# Altium footprint library Resistor$.PcbLib: 99 footprints (part 7 of 7)
Each footprint in its own frame and in the unit in brackets; x right, y up, seen from the top. Pads: shape width x height; smd on the part's side, far side on the other; paste and mask are expansions set on the pad; w line width, h text height; cw(c..) or ccw(c..) is an arc to the next point about the centre after c.
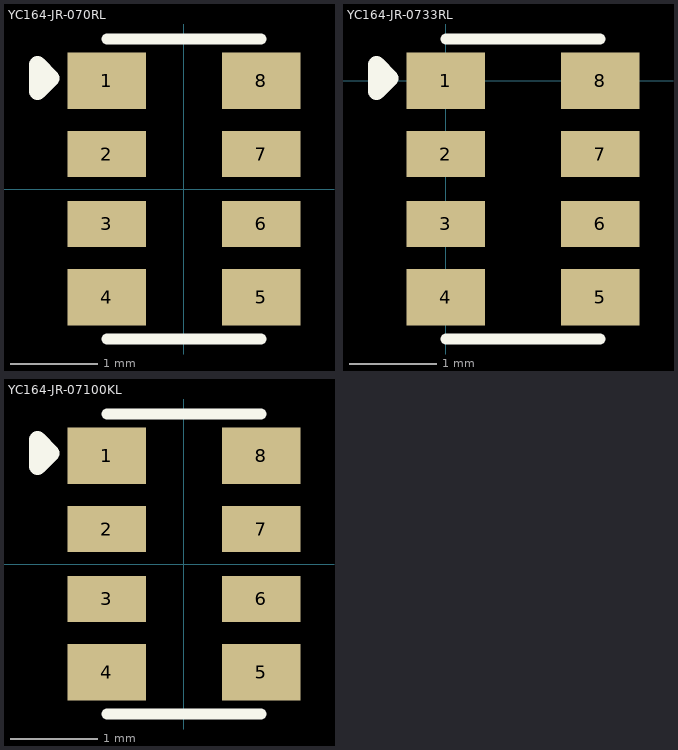
[diagram p6: the footprints below, top view; thin cyan lines are the x and y axes]

## YC164-JR-070RL [mm]
pads (8):
  rect 0.9x0.65 smd: 1(-0.885,1.24) 4(-0.885,-1.24) 5(0.885,-1.24) 8(0.885,1.24)
  rect 0.9x0.53 smd: 2(-0.885,0.4) 3(-0.885,-0.4) 6(0.885,-0.4) 7(0.885,0.4)
Top Overlay:
  lines w0.127: -0.88,-1.718 0.88,-1.718 ; -0.88,1.718 0.88,1.718
  lines w0.2: -1.676,1.118 -1.524,1.27 -1.676,1.422 -1.676,1.118
3D body "YC164-JR-070RL.STEP": height 0.7, standoff 0, extent -0.8,-1.6 0.8,1.6

## YC164-JR-0733RL [mm]
pads (8):
  rect 0.9x0.65 smd: 1(0,0) 4(0,-2.48) 5(1.77,-2.48) 8(1.77,0)
  rect 0.9x0.53 smd: 2(0,-0.84) 3(0,-1.64) 6(1.77,-1.64) 7(1.77,-0.84)
Top Overlay:
  lines w0.127: 0.005,-2.958 1.765,-2.958 ; 0.005,0.478 1.765,0.478
  lines w0.2: -0.791,-0.122 -0.639,0.03 -0.791,0.182 -0.791,-0.122
3D body "YC164-JR-070RL.STEP": height 0.7, standoff 0, extent 0.085,-2.84 1.685,0.36

## YC164-JR-07100KL [mm]
pads (8):
  rect 0.9x0.65 smd: 1(-0.885,1.24) 4(-0.885,-1.24) 5(0.885,-1.24) 8(0.885,1.24)
  rect 0.9x0.53 smd: 2(-0.885,0.4) 3(-0.885,-0.4) 6(0.885,-0.4) 7(0.885,0.4)
Top Overlay:
  lines w0.127: -0.88,-1.718 0.88,-1.718 ; -0.88,1.718 0.88,1.718
  lines w0.2: -1.676,1.118 -1.676,1.422 -1.524,1.27 -1.676,1.118
3D body "YC164-JR-070RL.STEP": height 0.7, standoff 0, extent -0.8,-1.6 0.8,1.6